# Altium integrated library IR Sensor.IntLib: 16 symbols
Pins are listed as number, name and electrical type; pins without a type are passive.

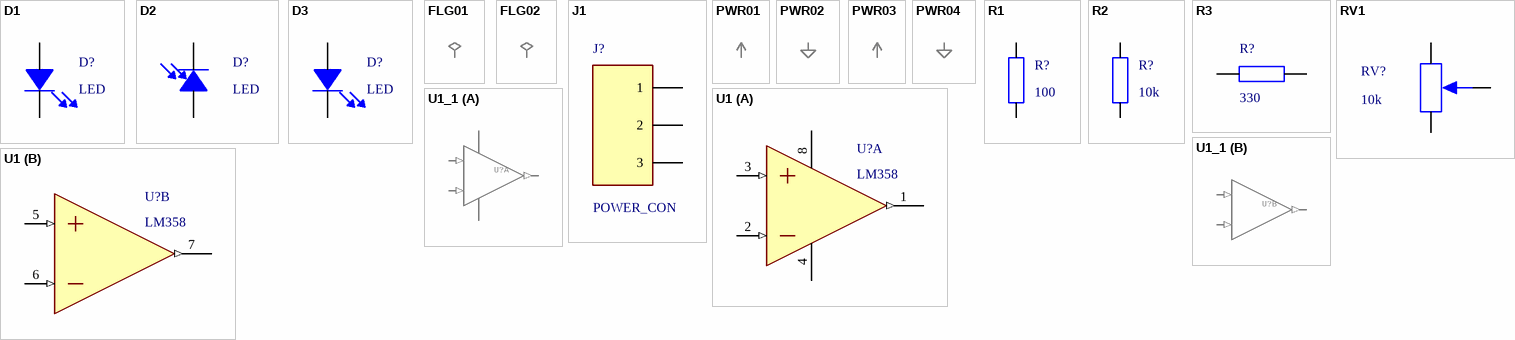
[diagram p0: symbols D1 to U1_1]

## D1
designator D?, comment LED
GateName_1: G$1; SymbolName_1: D1; LibraryName: IR Sensor; DeviceSetName: D1; Package: D1
footprint D1
pins: 1, 2

## D2
designator D?, comment LED
GateName_1: G$1; SymbolName_1: D2; LibraryName: IR Sensor; DeviceSetName: D2; Package: D2
footprint D2
pins: 1, 2

## D3
designator D?, comment LED
GateName_1: G$1; SymbolName_1: D3; LibraryName: IR Sensor; DeviceSetName: D3; Package: D3
footprint D3
pins: 1, 2

## FLG01
designator FLG?
GateName_1: G$1; SymbolName_1: FLG01; LibraryName: IR Sensor; DeviceSetName: FLG01
pins: ?1 1 (out)

## FLG02
designator FLG?
GateName_1: G$1; SymbolName_1: FLG02; LibraryName: IR Sensor; DeviceSetName: FLG02
pins: ?1 1 (out)

## J1
designator J?, comment POWER_CON
GateName_1: G$1; SymbolName_1: J1; LibraryName: IR Sensor; DeviceSetName: J1; Package: J1
footprint J1
pins: 1, 2, 3

## PWR01
designator PWR?
GateName_1: G$1; SymbolName_1: PWR01; LibraryName: IR Sensor; DeviceSetName: PWR01
pins: ?1 +5V (power)

## PWR02
designator PWR?
GateName_1: G$1; SymbolName_1: PWR02; LibraryName: IR Sensor; DeviceSetName: PWR02
pins: ?1 GND (power)

## PWR03
designator PWR?
GateName_1: G$1; SymbolName_1: PWR03; LibraryName: IR Sensor; DeviceSetName: PWR03
pins: ?1 +5V (power)

## PWR04
designator PWR?
GateName_1: G$1; SymbolName_1: PWR04; LibraryName: IR Sensor; DeviceSetName: PWR04
pins: ?1 GND (power)

## R1
designator R?, comment 100
GateName_1: G$1; SymbolName_1: R1; LibraryName: IR Sensor; DeviceSetName: R1; Package: R1
footprint R1
pins: 1, 2

## R2
designator R?, comment 10k
GateName_1: G$1; SymbolName_1: R2; LibraryName: IR Sensor; DeviceSetName: R2; Package: R2
footprint R2
pins: 1, 2

## R3
designator R?, comment 330
GateName_1: G$1; SymbolName_1: R3; LibraryName: IR Sensor; DeviceSetName: R3; Package: R3
footprint R3
pins: 1, 2

## RV1
designator RV?, comment 10k
GateName_1: G$1; SymbolName_1: RV1; LibraryName: IR Sensor; DeviceSetName: RV1; Package: RV1
footprint RV1
pins: 1, 2, 3

## U1
designator U?, comment LM358
GateName_1: G$1; SymbolName_1: U1; GateName_2: B; SymbolName_2: U1_B; LibraryName: IR Sensor; DeviceSetName: U1; Package: U1
footprint U1
part A pins: 1 (out), 2 IN- (in), 3 IN+ (in), 4 V- (power), 8 V+ (power)
part B pins: 5 IN+ (in), 6 IN- (in), 7 (out)

## U1_1
designator U?
GateName_1: G$1; SymbolName_1: U1; GateName_2: B; SymbolName_2: U1_B; LibraryName: IR Sensor; DeviceSetName: U1; Package: U1
footprint U1
part A pins: 1 (out), 2 IN- (in), 3 IN+ (in), 4 V- (power), 8 V+ (power)
part B pins: 5 IN+ (in), 6 IN- (in), 7 (out)